# Altium schematic symbol library SC8205S.SchLib: 1 symbol
Pins are listed as number, name and electrical type; pins without a type are passive.

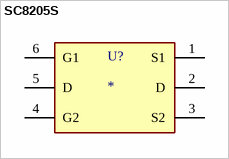
[diagram p0: symbol SC8205S]

## SC8205S
designator U?
SC8205S – Dual N-Channel Enhancement Mode Power MOSFET, SOT-23-6 Package.; MF: Texas Instruments; MP: SN6505ADBVR; SnapEDA_Link: https://www.snapeda.com/parts/SN6505ADBVR/Texas+Instruments/view-part/?ref=snap; Package: SOT-23-6 Texas Instruments; Value: *; Check_prices: https://www.snapeda.com/parts/SN6505ADBVR/Texas+Instruments/view-part/?ref=eda
footprint IC_SN6505ADBVR
pins: 1 S1 (power), 2 D, 3 S2, 4 G2 (power), 5 D, 6 G1